# Altium footprint library Copy of SiPAP_Footprints.PcbLib: 24 footprints (part 1 of 2)
Each footprint in its own frame and in the unit in brackets; x right, y up, seen from the top. Pads: shape width x height; smd on the part's side, far side on the other; paste and mask are expansions set on the pad; w line width, h text height; cw(c..) or ccw(c..) is an arc to the next point about the centre after c.
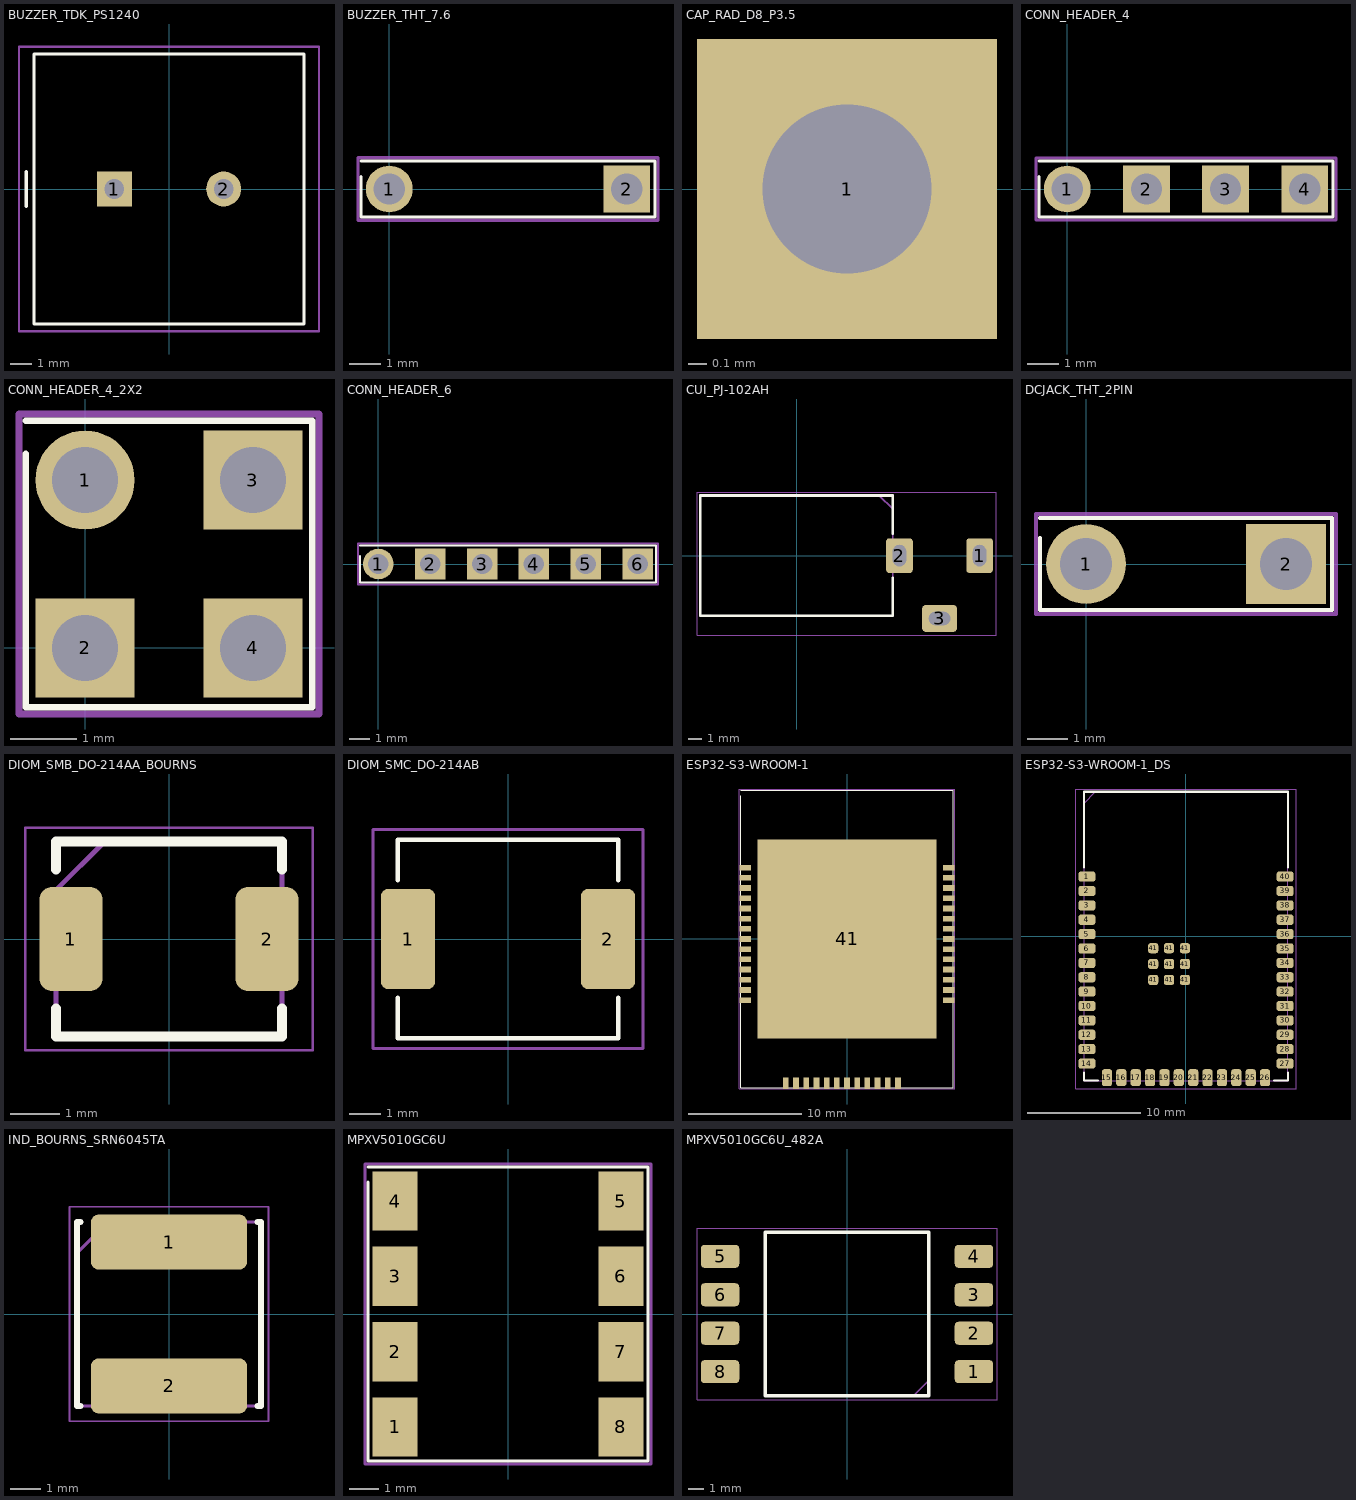
[diagram p0: the footprints below, top view; thin cyan lines are the x and y axes]

## BUZZER_TDK_PS1240 [mil] "TDK PS1240P02BT piezo buzzer (TDK PS series p2-3: dia 12.2, H 6.5, pitch 5.0, pin 0.65). Hole 0.9 mm."
pads (2):
  rect 63x63 hole 35.4: 1(-98.42,0)
  round 63 hole 35.4: 2(98.42,0)
Top Overlay:
  lines w6: -257,-31.5 -257,31.5 ; -243,-243 -243,243 243,243 243,-243 -243,-243
Mechanical 1:
  lines w4: -270,-256 -270,256 270,256 270,-256 -270,-256
3D body: height 255.91, standoff 0, extent -240.16,-240.16 240.16,240.16

## BUZZER_THT_7.6 [mm] "Generic THT piezo buzzer, 7.6mm pin pitch"
pads (2):
  round 1.5 on Top hole 1: 1(0,0)
  rect 1.5x1.5 on Top hole 1: 2(7.6,0)
Top Overlay:
  lines w0.1: -0.9,0.4 -0.9,-0.9 8.5,-0.9 8.5,0.9 -0.9,0.9
Mechanical 15:
  lines w0.1: -1,-1 8.6,-1 8.6,1 -1,1 -1,-1
3D body: height 9.5, standoff 0, extent -2.2,-6 9.8,6

## CAP_RAD_D8_P3.5 [mil] "Radial aluminium electrolytic D8 mm, lead pitch 3.5 mm, lead 0.6 mm (Panasonic EEU-FC1E221, FC-A series p6). Pad 1 (square) = +. Hole 0.9 mm."
pads (1):
  rect 63x63 hole 35.4: 1(-68.9,0)

## CONN_HEADER_4 [mm] "4-pin THT header, single row, 2.54mm pitch (OLED / buck module)"
pads (4):
  round 1.5 on Top hole 1: 1(0,0)
  rect 1.5x1.5 on Top hole 1: 2(2.54,0) 3(5.08,0) 4(7.62,0)
Top Overlay:
  lines w0.1: -0.9,0.4 -0.9,-0.9 8.52,-0.9 8.52,0.9 -0.9,0.9
Mechanical 15:
  lines w0.1: -1,-1 -1,1 8.62,1 8.62,-1 -1,-1
3D body: height 2.5, standoff 0, extent -1.27,-1.27 8.89,1.27
3D body: height 8.5, standoff 2.5, extent -0.5,-0.5 8.12,0.5

## CONN_HEADER_4_2X2 [mm] "4-pin THT header, 2x2, 2.54mm pitch (blower cable connector)"
pads (4):
  round 1.5 on Top hole 1: 1(0,2.54)
  rect 1.5x1.5 on Top hole 1: 2(0,0) 3(2.54,2.54) 4(2.54,0)
Top Overlay:
  lines w0.1: -0.9,2.94 -0.9,-0.9 3.44,-0.9 3.44,3.44 -0.9,3.44
Mechanical 15:
  lines w0.1: -1,-1 -1,3.54 3.54,3.54 3.54,-1 -1,-1
3D body: height 2.5, standoff 0, extent -1.27,-1.27 3.81,3.81
3D body: height 8.5, standoff 2.5, extent -0.5,-0.5 3.04,3.04

## CONN_HEADER_6 [mm] "6-pin THT header 2.54mm pitch, single row (for SFM3300-D cable connector)"
pads (6):
  round 1.5 on Top hole 1: 1(0,0)
  rect 1.5x1.5 on Top hole 1: 2(2.54,0) 3(5.08,0) 4(7.62,0) 5(10.16,0) 6(12.7,0)
Top Overlay:
  lines w0.1: -0.9,0.4 -0.9,-0.9 13.6,-0.9 13.6,0.9 -0.9,0.9
Mechanical 15:
  lines w0.1: -1,-1 -1,1 13.7,1 13.7,-1 -1,-1
3D body: height 2.5, standoff 0, extent -1.27,-1.27 13.97,1.27
3D body: height 8.5, standoff 2.5, extent -0.5,-0.5 13.2,0.5

## CUI_PJ-102AH [mm] "Custom, 3 pads; custom lands, density N (nominal); from Same Sky PJ-102AH datasheet (09/12/2024), Recommended PCB Layout Top View, p. 2; Same Sky PJ-102AH DC jack, 2.0 mm pin, 5 A. Layout p2. Origin = plug-entry face on jack axis (place at board edge). Pin1 centre (+), pin2 sleeve, pin3 switch. Slots 1.0x1.6."
height 11
pads (3):
  rrect25% 2x2.6 hole 1 slot 1.6 at 90 deg: 1(13.7,0) 2(7.7,0)
  rrect25% 2.6x2 hole 1 slot 1.6 at 0 deg: 3(10.7,-4.7)
Top Overlay:
  lines w0.2: 7.2,-1.65 7.2,-4.5 -7.2,-4.5 -7.2,4.5 7.2,4.5 7.2,1.65
Mechanical 13:
  lines w0.1: -7.2,-4.5 7.2,-4.5 7.2,3.5 6.2,4.5 -7.2,4.5 -7.2,-4.5
  text ".Designator" at -5.075,-0.5 h1
Mechanical 15:
  lines w0.05: -7.45,-5.95 14.95,-5.95 14.95,4.75 -7.45,4.75 -7.45,-5.95
3D body: height 11, standoff 0, extent 0,-4.5 14.4,4.5

## DCJACK_THT_2PIN [mm] "Generic 2-pin THT DC barrel jack footprint, 5mm pitch"
pads (2):
  round 2 on Top hole 1.3: 1(0,0)
  rect 2x2 on Top hole 1.3: 2(5,0)
Top Overlay:
  lines w0.1: -1.15,0.65 -1.15,-1.15 6.15,-1.15 6.15,1.15 -1.15,1.15
Mechanical 15:
  lines w0.1: -1.25,-1.25 -1.25,1.25 6.25,1.25 6.25,-1.25 -1.25,-1.25
3D body: height 11, standoff 0, extent -2,-7 7,7

## DIOM_SMB_DO-214AA_BOURNS [mm] "Custom, 2 pads; custom lands, density N (nominal); from Bourns SMBJ Series TVS datasheet, Recommended Footprint SMB (DO-214AA), p. 3; Bourns SMB (DO-214AA) recommended footprint p3. Pad1 = cathode (band), pad2 = anode."
height 2.44
pads (2):
  rrect39% 1.27x2.1 smd: 1(-1.98,0) 2(1.98,0)
Top Overlay:
  lines w0.2: -2.285,-1.4 -2.285,-1.97 2.285,-1.97 2.285,-1.4 ; -2.285,1.4 -2.285,1.97 2.285,1.97 2.285,1.4
Mechanical 13:
  lines w0.1: -2.285,-1.97 -2.285,0.985 -1.3,1.97 2.285,1.97 2.285,-1.97 -2.285,-1.97
  text ".Designator" at -2.055,-0.202 h0.41
Mechanical 15:
  lines w0.05: -2.9,-2.25 -2.9,2.25 2.9,2.25 2.9,-2.25 -2.9,-2.25
3D body: height 2.44, standoff 0, extent -2.3,-1.95 2.3,1.95

## DIOM_SMC_DO-214AB [mil] "DO-214AB (SMC) diode, Vishay SMC mounting pad layout (pad 3.20 x 1.72mm, gap 4.69mm, 8.13mm overall). Pad1=A, Pad2=K (cathode band at pad 2)"
pads (2):
  rrect25% 68x126 smd: 1(-126,0) 2(126,0)
Top Overlay:
  lines w6: -139,-74 -139,-125 139,-125 139,-74 ; -139,74 -139,125 139,125 139,74
Mechanical 1:
  lines w4: -170,-138 -170,138 170,138 170,-138 -170,-138
3D body: height 103.15, standoff 0, extent -137.8,-118.11 137.8,118.11

## ESP32-S3-WROOM-1 [mm] "Espressif ESP32-S3-WROOM-1 castellated module, 18x25.5mm body, 0.9mm pitch (datasheet Fig 10-1, v1.8)"
pads (41):
  rect 1x0.5 smd: 1(-9,6.3) 2(-9,5.4) 3(-9,4.5) 4(-9,3.6) 5(-9,2.7) 6(-9,1.8) 7(-9,0.9) 8(-9,0) 9(-9,-0.9) 10(-9,-1.8) 11(-9,-2.7) 12(-9,-3.6) 13(-9,-4.5) 14(-9,-5.4) 27(9,-5.4) 28(9,-4.5) 29(9,-3.6) 30(9,-2.7) 31(9,-1.8) 32(9,-0.9) 33(9,0) 34(9,0.9) 35(9,1.8) 36(9,2.7) 37(9,3.6) 38(9,4.5) 39(9,5.4) 40(9,6.3)
  rect 0.5x1 smd: 15(-5.4,-12.75) 16(-4.5,-12.75) 17(-3.6,-12.75) 18(-2.7,-12.75) 19(-1.8,-12.75) 20(-0.9,-12.75) 21(0,-12.75) 22(0.9,-12.75) 23(1.8,-12.75) 24(2.7,-12.75) 25(3.6,-12.75) 26(4.5,-12.75)
  rect 15.8x17.6 smd: 41(0,0)
Top Overlay:
  lines w0.1: -9.4,12.65 -9.4,-13.15 9.4,-13.15 9.4,13.15 -9.4,13.15
Mechanical 15:
  lines w0.1: -9.5,-13.25 -9.5,13.25 9.5,13.25 9.5,-13.25 -9.5,-13.25

## ESP32-S3-WROOM-1_DS [mm] "Custom, 41 pads; custom lands, density N (nominal); from ESP32-S3-WROOM-1 & WROOM-1U Datasheet, v1.8, Figure 11-1 Recommended PCB Land Pattern, p. 45; Espressif datasheet v1.8 Fig 11-1. Origin = module centre. Antenna area = top 6 mm: keep copper out."
height 3.1
pads (49):
  rrect50% 1.5x0.9 smd: 1(-8.75,5.26) 2(-8.75,3.99) 3(-8.75,2.72) 4(-8.75,1.45) 5(-8.75,0.18) 6(-8.75,-1.09) 7(-8.75,-2.36) 8(-8.75,-3.63) 9(-8.75,-4.9) 10(-8.75,-6.17) 11(-8.75,-7.44) 12(-8.75,-8.71) 13(-8.75,-9.98) 14(-8.75,-11.25) 27(8.75,-11.25) 28(8.75,-9.98) 29(8.75,-8.71) 30(8.75,-7.44) 31(8.75,-6.17) 32(8.75,-4.9) 33(8.75,-3.63) 34(8.75,-2.36) 35(8.75,-1.09) 36(8.75,0.18) 37(8.75,1.45) 38(8.75,2.72) 39(8.75,3.99) 40(8.75,5.26)
  rrect50% 0.9x1.5 smd: 15(-6.985,-12.5) 16(-5.715,-12.5) 17(-4.445,-12.5) 18(-3.175,-12.5) 19(-1.905,-12.5) 20(-0.635,-12.5) 21(0.635,-12.5) 22(1.905,-12.5) 23(3.175,-12.5) 24(4.445,-12.5) 25(5.715,-12.5) 26(6.985,-12.5)
  rrect50% 0.9x0.9 smd: 41(-2.9,-3.86) 41(-2.9,-2.46) 41(-2.9,-1.06) 41(-1.5,-3.86) 41(-1.5,-2.46) 41(-1.5,-1.06) 41(-0.1,-3.86) 41(-0.1,-2.46) 41(-0.1,-1.06)
Top Overlay:
  lines w0.2: -9,-12.05 -9,-12.75 -7.785,-12.75 ; -9,6.06 -9,12.75 9,12.75 9,6.06 ; 7.785,-12.75 9,-12.75 9,-12.05
Mechanical 13:
  lines w0.1: -9,-12.75 9,-12.75 9,12.75 -8,12.75 -9,11.75 -9,-12.75
  text ".Designator" at -5.075,-0.5 h1
Mechanical 15:
  lines w0.05: -9.75,-13.5 9.75,-13.5 9.75,13 -9.75,13 -9.75,-13.5
3D body: height 0.8, standoff 0, extent -9,-12.75 9,12.75
3D body: height 3.1, standoff 0.8, extent -7.9,-11.7 7.9,5.9

## IND_BOURNS_SRN6045TA [mm] "Custom, 2 pads; custom lands, density N (nominal); from Bourns SRN6045TA Series datasheet, Recommended Layout, p. 1; Bourns SRN6045TA power inductor, recommended layout p1 (6.0x6.0 body, 4.25+/-0.3 tall)."
height 4.55
pads (2):
  rrect28% 5.1x1.8 smd: 1(0,2.35) 2(0,-2.35)
Top Overlay:
  lines w0.2: -2.9,-3 -3,-3 -3,3 -2.9,3 ; 2.9,-3 3,-3 3,3 2.9,3
Mechanical 13:
  lines w0.1: -3,-3 -3,2 -2,3 3,3 3,-3 -3,-3
  text ".Designator" at -2.7,-0.266 h0.53
Mechanical 15:
  lines w0.05: -3.25,-3.5 -3.25,3.5 3.25,3.5 3.25,-3.5 -3.25,-3.5
3D body: height 4.55, standoff 0, extent -3,-3 3,3

## MPXV5010GC6U [mm] "NXP/Motorola Case 482A SOP-8, 2.54mm pitch, 7.62mm row span (Fig 5, Motorola datasheet Rev 8)"
pads (8):
  rect 1.52x2 smd: 1(-3.81,-3.81) 2(-3.81,-1.27) 3(-3.81,1.27) 4(-3.81,3.81) 5(3.81,3.81) 6(3.81,1.27) 7(3.81,-1.27) 8(3.81,-3.81)
Top Overlay:
  lines w0.1: -4.72,4.46 -4.72,-4.96 4.72,-4.96 4.72,4.96 -4.72,4.96
Mechanical 15:
  lines w0.1: -4.82,-5.06 -4.82,5.06 4.82,5.06 4.82,-5.06 -4.82,-5.06

## MPXV5010GC6U_482A [mm] "Custom, 8 pads; custom lands, density N (nominal); from Motorola MPX5010/MPXV5010G Series datasheet (MPX5010/D), 2001, Figure 5 SOP Footprint (Case 482), p. 6; Case 482A land pattern per datasheet Fig 5 p6; pin order per Case 482A top view p7. Height 13.21 max incl. port."
height 13.21
pads (8):
  rrect33% 2.54x1.52 smd: 1(8.38,-3.81) 2(8.38,-1.27) 3(8.38,1.27) 4(8.38,3.81) 5(-8.38,3.81) 6(-8.38,1.27) 7(-8.38,-1.27) 8(-8.38,-3.81)
Top Overlay:
  lines w0.2: -5.395,-5.395 5.395,-5.395 5.395,5.395 -5.395,5.395 -5.395,-5.395
Mechanical 13:
  lines w0.1: -5.395,-5.395 4.395,-5.395 5.395,-4.395 5.395,5.395 -5.395,5.395 -5.395,-5.395
  text ".Designator" at -4.852,-0.478 h0.96
Mechanical 15:
  lines w0.05: -9.9,-5.65 9.9,-5.65 9.9,5.65 -9.9,5.65 -9.9,-5.65
3D body: height 6.99, standoff 0, extent -5.395,-5.395 5.395,5.395
3D body: height 13.21, standoff 6.99, extent -1.585,-1.585 1.585,1.585
3D body: height 1, standoff 0, extent -9.205,-4.35 9.205,4.35

## PCBComponent_1 [mm]